# Altium footprint library Connector_FPC.PcbLib: 36 footprints (part 2 of 3)
Each footprint in its own frame and in the unit in brackets; x right, y up, seen from the top. Pads: shape width x height; smd on the part's side, far side on the other; paste and mask are expansions set on the pad; w line width, h text height; cw(c..) or ccw(c..) is an arc to the next point about the centre after c.
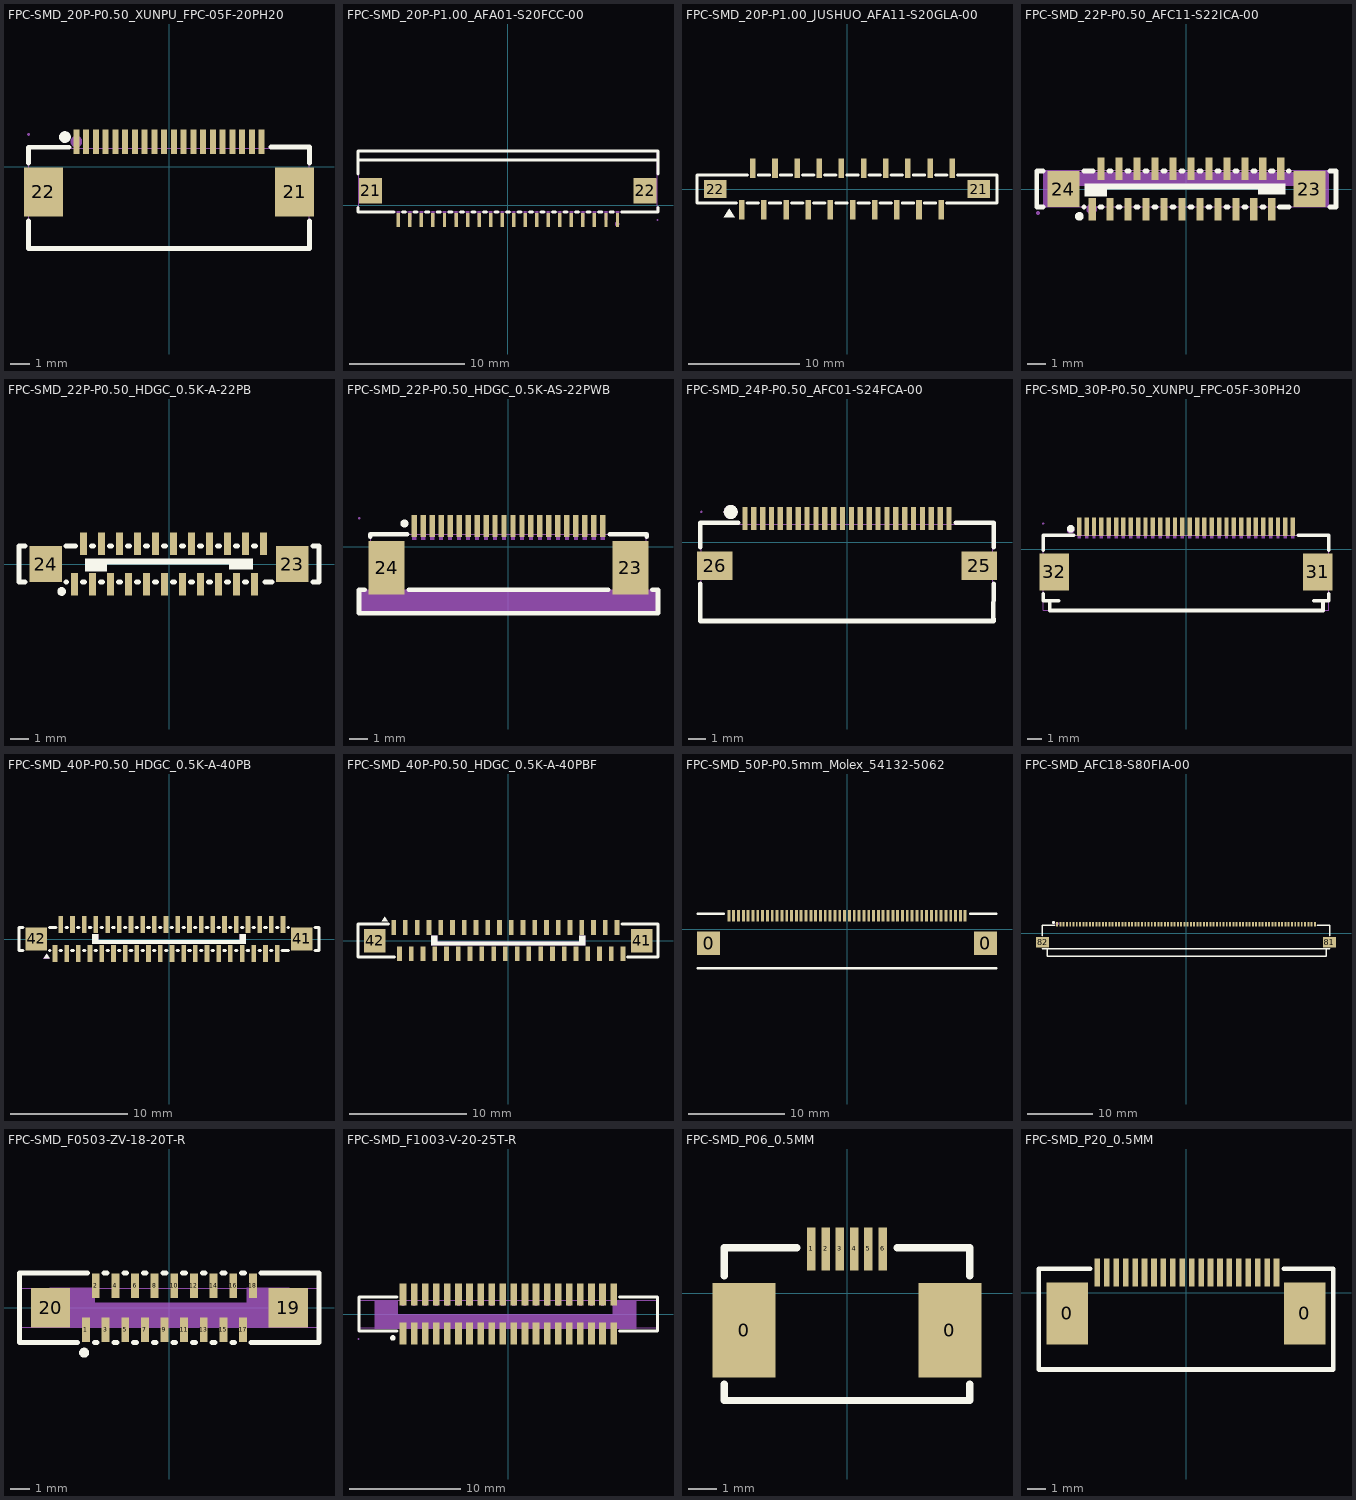
[diagram p1: the footprints below, top view; thin cyan lines are the x and y axes]

## FPC-SMD_20P-P0.50_XUNPU_FPC-05F-20PH20 [mm]
pads (22):
  rect 0.3x1.25 smd paste+0 mask+0.05: 1(-4.75,1.288) 2(-4.25,1.288) 3(-3.75,1.288) 4(-3.25,1.288) 5(-2.75,1.288) 6(-2.25,1.288) 7(-1.75,1.288) 8(-1.25,1.288) 9(-0.75,1.288) 10(-0.25,1.288) 11(0.25,1.288) 12(0.75,1.288) 13(1.25,1.288) 14(1.75,1.288) 15(2.25,1.288) 16(2.75,1.288) 17(3.25,1.288) 18(3.75,1.288) 19(4.25,1.288) 20(4.75,1.288)
  rect 2x2.5 smd paste+0 mask+0.05: 21(6.44,-1.287) 22(-6.44,-1.287)
Top Overlay:
  circle w0.3: c-5.334,1.524 r0.15
  lines w0.254: -7.2,-2.769 -7.2,-3.912 -7.2,-4.191 7.2,-4.191 7.2,-3.912 7.2,-2.769 ; -7.2,0.194 -7.2,1 -5.131,1 ; 5.223,1.016 7.2,1.016 7.2,0.194
Mechanical 4:
  circle w0.3: c-4.75,1.288 r0.15
Mechanical 7:
  lines w0.051: -7.2,-4.157 7.2,-4.157 7.2,0.963 -7.2,0.963 -7.2,-4.157
Mechanical 9:
  region: -7.26,1.663 -7.26,1.638 -7.225,1.603 -7.175,1.603 -7.14,1.638 -7.14,1.663 -7.14,1.687 -7.175,1.723 -7.225,1.723 -7.26,1.687 -7.26,1.663
Mechanical 10:
  region: -7.2,-1.788 -7.2,-0.788 -6,-0.788 -6,-1.788
  region: 6,-1.788 6,-0.788 7.2,-0.788 7.2,-1.788
  region: -4.825,1.663 -4.675,1.663 -4.675,0.912 -4.825,0.912
  region: -4.325,1.663 -4.175,1.663 -4.175,0.912 -4.325,0.912
  region: -3.825,1.663 -3.675,1.663 -3.675,0.912 -3.825,0.912
  region: -3.325,1.663 -3.175,1.663 -3.175,0.912 -3.325,0.912
  region: -2.825,1.663 -2.675,1.663 -2.675,0.912 -2.825,0.912
  region: -2.325,1.663 -2.175,1.663 -2.175,0.912 -2.325,0.912
  region: -1.825,1.663 -1.675,1.663 -1.675,0.912 -1.825,0.912
  region: -1.325,1.663 -1.175,1.663 -1.175,0.912 -1.325,0.912
  region: -0.825,1.663 -0.675,1.663 -0.675,0.912 -0.825,0.912
  region: -0.325,1.663 -0.175,1.663 -0.175,0.912 -0.325,0.912
  region: 0.175,1.663 0.325,1.663 0.325,0.912 0.175,0.912
  region: 0.675,1.663 0.825,1.663 0.825,0.912 0.675,0.912
  region: 1.175,1.663 1.325,1.663 1.325,0.912 1.175,0.912
  region: 1.675,1.663 1.825,1.663 1.825,0.912 1.675,0.912
  region: 2.175,1.663 2.325,1.663 2.325,0.912 2.175,0.912
  region: 2.675,1.663 2.825,1.663 2.825,0.912 2.675,0.912
  region: 3.175,1.663 3.325,1.663 3.325,0.912 3.175,0.912
  region: 3.675,1.663 3.825,1.663 3.825,0.912 3.675,0.912
  region: 4.175,1.663 4.325,1.663 4.325,0.912 4.175,0.912
  region: 4.675,1.663 4.825,1.663 4.825,0.912 4.675,0.912
3D body "3.step": height 2.01, standoff 0, extent -7.2,-3.86 7.2,1.26

## FPC-SMD_20P-P1.00_AFA01-S20FCC-00 [mm]
pads (22):
  rect 0.3x1.25 smd mask+0.051: 1(9.5,-1.263) 2(8.5,-1.263) 3(7.5,-1.263) 4(6.5,-1.263) 5(5.5,-1.263) 6(4.5,-1.263) 7(3.5,-1.263) 8(2.5,-1.263) 9(1.5,-1.263) 10(0.5,-1.263) 11(-0.5,-1.263) 12(-1.5,-1.263) 13(-2.5,-1.263) 14(-3.5,-1.263) 15(-4.5,-1.263) 16(-5.5,-1.263) 17(-6.5,-1.263) 18(-7.5,-1.263) 19(-8.5,-1.263) 20(-9.5,-1.263)
  rect 2x2.2 smd mask+0.051: 21(-11.9,1.263) 22(11.9,1.263)
Top Overlay:
  lines w0.254: -13,-0.196 -13,-0.562 -9.869,-0.562 ; -13,2.721 -13,4.737 13,4.737 13,2.721 ; -13,3.938 13,3.938 ; -9.132,-0.562 -8.869,-0.562 ; -8.132,-0.562 -7.869,-0.562 ; -7.132,-0.562 -6.869,-0.562 ; -6.132,-0.562 -5.869,-0.562 ; -5.132,-0.562 -4.869,-0.562 ; -4.132,-0.562 -3.869,-0.562 ; -3.132,-0.562 -2.869,-0.562 ; -2.132,-0.562 -1.869,-0.562 ; -1.132,-0.562 -0.869,-0.562 ; -0.132,-0.562 0.131,-0.562 ; 0.868,-0.562 1.131,-0.562 ; 1.868,-0.562 2.131,-0.562 ; 2.868,-0.562 3.131,-0.562 ; 3.868,-0.562 4.131,-0.562 ; 4.868,-0.562 5.131,-0.562 ; 5.868,-0.562 6.131,-0.562 ; 6.868,-0.562 7.131,-0.562 ; 7.868,-0.562 8.131,-0.562 ; 8.868,-0.562 9.131,-0.562 ; 9.868,-0.562 13,-0.562 13,-0.196
Mechanical 6:
  circle w0.2: c9.472,-1.607 r0.1
Mechanical 15:
  region: -12.95,2.263 -10.95,2.263 -10.95,0.263 -12.95,0.263
  region: 10.95,2.263 12.95,2.263 12.95,0.263 10.95,0.263
  region: 9.4,-1.262 9.4,-0.512 9.6,-0.512 9.6,-1.262
  region: 8.4,-1.262 8.4,-0.512 8.6,-0.512 8.6,-1.262
  region: 7.4,-1.262 7.4,-0.512 7.6,-0.512 7.6,-1.262
  region: 6.4,-1.262 6.4,-0.512 6.6,-0.512 6.6,-1.262
  region: 5.4,-1.262 5.4,-0.512 5.6,-0.512 5.6,-1.262
  region: 4.4,-1.262 4.4,-0.512 4.6,-0.512 4.6,-1.262
  region: 3.4,-1.262 3.4,-0.512 3.6,-0.512 3.6,-1.262
  region: 2.4,-1.262 2.4,-0.512 2.6,-0.512 2.6,-1.262
  region: 1.4,-1.262 1.4,-0.512 1.6,-0.512 1.6,-1.262
  region: 0.4,-1.262 0.4,-0.512 0.6,-0.512 0.6,-1.262
  region: -0.6,-1.262 -0.6,-0.512 -0.4,-0.512 -0.4,-1.262
  region: -1.6,-1.262 -1.6,-0.512 -1.4,-0.512 -1.4,-1.262
  region: -2.6,-1.262 -2.6,-0.512 -2.4,-0.512 -2.4,-1.262
  region: -3.6,-1.262 -3.6,-0.512 -3.4,-0.512 -3.4,-1.262
  region: -4.6,-1.262 -4.6,-0.512 -4.4,-0.512 -4.4,-1.262
  region: -5.6,-1.262 -5.6,-0.512 -5.4,-0.512 -5.4,-1.262
  region: -6.6,-1.262 -6.6,-0.512 -6.4,-0.512 -6.4,-1.262
  region: -7.6,-1.262 -7.6,-0.512 -7.4,-0.512 -7.4,-1.262
  region: -8.6,-1.262 -8.6,-0.512 -8.4,-0.512 -8.4,-1.262
  region: -9.6,-1.262 -9.6,-0.512 -9.4,-0.512 -9.4,-1.262
  region: 13.01,-1.262 13.01,-1.238 12.975,-1.202 12.925,-1.202 12.89,-1.238 12.89,-1.262 12.89,-1.287 12.925,-1.322 12.975,-1.322 13.01,-1.287 13.01,-1.262
  lines w0.051: -12.95,-0.562 12.95,-0.562 12.95,4.688 -12.95,4.688 -12.95,-0.562
3D body "FPC1.stp": height 2.01, standoff 0, extent -12.95,-1.498 12.95,4.472

## FPC-SMD_20P-P1.00_JUSHUO_AFA11-S20GLA-00 [mm]
pads (22):
  rect 0.5x1.75 smd: 1(-9.5,-1.875) 2(-8.5,1.875) 3(-7.5,-1.875) 4(-6.5,1.875) 5(-5.5,-1.875) 6(-4.5,1.875) 7(-3.5,-1.875) 8(-2.5,1.875) 9(-1.5,-1.875) 10(-0.5,1.875) 11(0.5,-1.875) 12(1.5,1.875) 13(2.5,-1.875) 14(3.5,1.875) 15(4.5,-1.875) 16(5.5,1.875) 17(6.5,-1.875) 18(7.5,1.875) 19(8.5,-1.875) 20(9.5,1.875)
  rect 2x1.6 smd: 21(11.9,0) 22(-11.9,0)
Top Overlay:
  region: -10.621,-1.778 -11.129,-2.54 -10.113,-2.54
  lines w0.254: -9.981,-1.25 -13.542,-1.25 -13.542,1.25 -8.981,1.25 ; -9.019,-1.25 -7.981,-1.25 ; -8.019,1.25 -6.981,1.25 ; -7.019,-1.25 -5.981,-1.25 ; -6.019,1.25 -4.981,1.25 ; -5.019,-1.25 -3.981,-1.25 ; -4.019,1.25 -2.981,1.25 ; -3.019,-1.25 -1.981,-1.25 ; -2.019,1.25 -0.981,1.25 ; -1.019,-1.25 0.019,-1.25 ; -0.019,1.25 1.019,1.25 ; 0.981,-1.25 2.019,-1.25 ; 1.981,1.25 3.019,1.25 ; 2.981,-1.25 4.019,-1.25 ; 3.981,1.25 5.019,1.25 ; 4.981,-1.25 6.019,-1.25 ; 5.981,1.25 7.019,1.25 ; 6.981,-1.25 8.019,-1.25 ; 7.981,1.25 9.019,1.25 ; 8.981,-1.25 10.019,-1.25 ; 9.981,1.25 13.542,1.25 13.542,-1.25 10.033,-1.25
3D body "X1.stp": height 5.4, standoff 0, extent -13.5,-2.25 13.5,2.25

## FPC-SMD_22P-P0.50_AFC11-S22ICA-00 [mm]
pads (24):
  rect 0.399x1.25 smd mask+0.05: 1(-5.249,-1.125) 2(-4.749,1.125) 3(-4.251,-1.125) 4(-3.75,1.125) 5(-3.25,-1.125) 6(-2.75,1.125) 7(-2.249,-1.125) 8(-1.749,1.125) 9(-1.248,-1.125) 10(-0.751,1.125) 11(-0.25,-1.125) 12(0.25,1.125) 13(0.751,-1.125) 14(1.251,1.125) 15(1.751,-1.125) 16(2.249,1.125) 17(2.75,-1.125) 18(3.25,1.125) 19(3.75,-1.125) 20(4.248,1.125) 21(4.749,-1.125) 22(5.249,1.125)
  rect 1.801x1.999 smd mask+0.05: 23(6.849,0) 24(-6.849,0)
Top Overlay:
  circle w0.254: c-5.96,-1.524 r0.114
  region: 5.501,0.3 5.501,-0.3 4,-0.3 4,0 -4.449,0 -4.449,-0.4 -5.649,-0.4 -5.649,0.3
  lines w0.254: -7.982,-1.001 -8.325,-1.001 -8.325,1.001 -8,1.001 -7.982,1.001 ; -5.719,-1.001 -5.681,-1.001 ; -5.719,1.001 -5.18,1.001 ; -4.82,-1.001 -4.68,-1.001 ; -4.319,1.001 -4.18,1.001 ; -3.819,-1.001 -3.682,-1.001 ; -3.319,1.001 -3.181,1.001 ; -2.818,-1.001 -2.681,-1.001 ; -2.318,1.001 -2.181,1.001 ; -1.817,-1.001 -1.68,-1.001 ; -1.32,1.001 -1.18,1.001 ; -0.819,-1.001 -0.682,-1.001 ; -0.319,1.001 -0.182,1.001 ; 0.182,-1.001 0.319,-1.001 ; 0.682,1.001 0.819,1.001 ; 1.182,-1.001 1.32,-1.001 ; 1.683,1.001 1.82,1.001 ; 2.181,-1.001 2.32,-1.001 ; 2.681,1.001 2.818,1.001 ; 3.181,-1.001 3.319,-1.001 ; 3.682,1.001 3.819,1.001 ; 4.18,-1.001 4.319,-1.001 ; 4.68,1.001 4.817,1.001 ; 5.18,-1.001 5.317,-1.001 5.719,-1.001 ; 5.681,1.001 5.719,1.001 ; 7.979,-1.001 8.325,-1.001 8.325,1.001 7.979,1.001
Mechanical 6:
  circle w0.3: c-5.276,-1.113 r0.15
  region: -6.35,0.175 -6.35,-0.925 -7.9,-0.925 -7.9,0.925 7.85,0.925 7.85,-0.875 6.35,-0.875 6.35,0.175
Mechanical 15:
  region: 5.132,1.521 5.332,1.521 5.332,0.721 5.132,0.721
  region: 4.632,-0.679 4.832,-0.679 4.832,-1.479 4.632,-1.479
  region: 4.132,1.521 4.332,1.521 4.332,0.721 4.132,0.721
  region: 3.632,-0.679 3.832,-0.679 3.832,-1.479 3.632,-1.479
  region: 3.132,1.521 3.332,1.521 3.332,0.721 3.132,0.721
  region: 2.632,-0.679 2.832,-0.679 2.832,-1.479 2.632,-1.479
  region: 2.132,1.521 2.332,1.521 2.332,0.721 2.132,0.721
  region: 1.632,-0.679 1.832,-0.679 1.832,-1.479 1.632,-1.479
  region: 1.132,1.521 1.332,1.521 1.332,0.721 1.132,0.721
  region: 0.632,-0.679 0.832,-0.679 0.832,-1.479 0.632,-1.479
  region: 0.132,1.521 0.332,1.521 0.332,0.721 0.132,0.721
  region: -0.368,-0.679 -0.168,-0.679 -0.168,-1.479 -0.368,-1.479
  region: -0.868,1.521 -0.668,1.521 -0.668,0.721 -0.868,0.721
  region: -1.368,-0.679 -1.168,-0.679 -1.168,-1.479 -1.368,-1.479
  region: -1.868,1.521 -1.668,1.521 -1.668,0.721 -1.868,0.721
  region: -2.368,-0.679 -2.168,-0.679 -2.168,-1.479 -2.368,-1.479
  region: -2.868,1.521 -2.668,1.521 -2.668,0.721 -2.868,0.721
  region: -3.368,-0.679 -3.168,-0.679 -3.168,-1.479 -3.368,-1.479
  region: -3.868,1.521 -3.668,1.521 -3.668,0.721 -3.868,0.721
  region: -4.368,-0.679 -4.168,-0.679 -4.168,-1.479 -4.368,-1.479
  region: -4.868,1.521 -4.668,1.521 -4.668,0.721 -4.868,0.721
  region: -5.368,-0.679 -5.168,-0.679 -5.168,-1.479 -5.368,-1.479
  region: 7.932,1.041 7.932,-0.959 6.132,-0.959 6.132,1.041
  region: -6.168,1.051 -6.168,-0.949 -7.968,-0.949 -7.968,1.051
  region: -8.176,-1.335 -8.176,-1.294 -8.235,-1.235 -8.318,-1.235 -8.376,-1.294 -8.376,-1.335 -8.376,-1.377 -8.318,-1.435 -8.235,-1.435 -8.176,-1.377 -8.176,-1.335
  lines w0.051: -8.318,-0.999 -8.318,0.741 cw(c-8.018,0.741) -8.018,1.041 -7.988,1.041 5.332,1.041 8.012,1.041 8.052,1.041 cw(c8.052,0.801) 8.292,0.801 8.292,-0.989 8.292,-0.999 -8.318,-0.999
3D body "AFC11-S22ICC-001.step": height 4.4, standoff 0, extent -8.3,-1.5 8.3,1.5

## FPC-SMD_22P-P0.50_HDGC_0.5K-A-22PB [mil]
pads (24):
  rect 15.7x49.2 smd mask+1.97: 1(-206.7,-44.3) 2(-187,44.3) 3(-167.4,-44.3) 4(-147.7,44.3) 5(-128,-44.3) 6(-108.3,44.3) 7(-88.6,-44.3) 8(-68.9,44.3) 9(-49.2,-44.3) 10(-29.6,44.3) 11(-9.9,-44.3) 12(9.8,44.3) 13(29.5,-44.3) 14(49.2,44.3) 15(68.9,-44.3) 16(88.5,44.3) 17(108.2,-44.3) 18(127.9,44.3) 19(147.6,-44.3) 20(167.3,44.3) 21(187,-44.3) 22(206.7,44.3)
  rect 70.9x78.7 smd mask+1.97: 23(269.7,0) 24(-269.7,0)
Top Overlay:
  circle w10: c-234.7,-60 r4.5
  region: 183.07,11.81 183.07,-11.81 131.89,-11.81 131.89,0 -135.83,0 -135.83,-15.75 -183.07,-15.75 -183.07,11.81 183.07,11.81
  lines w10: -314.3,-39.4 -327.8,-39.4 -327.8,39.4 -315,39.4 -314.3,39.4 ; -225.2,-39.4 -223.7,-39.4 ; -225.2,39.4 -204,39.4 ; -189.8,-39.4 -184.3,-39.4 ; -170.1,39.4 -164.6,39.4 ; -150.4,-39.4 -145,-39.4 ; -130.7,39.4 -125.3,39.4 ; -111,-39.4 -105.6,-39.4 ; -91.3,39.4 -85.9,39.4 ; -71.6,-39.4 -66.2,-39.4 ; -52,39.4 -46.5,39.4 ; -32.3,-39.4 -26.9,-39.4 ; -12.6,39.4 -7.2,39.4 ; 7.1,-39.4 12.5,-39.4 ; 26.8,39.4 32.2,39.4 ; 46.5,-39.4 51.9,-39.4 ; 66.2,39.4 71.6,39.4 ; 85.8,-39.4 91.3,-39.4 ; 105.5,39.4 110.9,39.4 ; 125.2,-39.4 130.6,-39.4 ; 144.9,39.4 150.3,39.4 ; 164.6,-39.4 170,-39.4 ; 184.3,39.4 189.7,39.4 ; 209.4,-39.4 225.2,-39.4 ; 314.2,-39.4 327.8,-39.4 327.8,39.4 314.2,39.4
3D body "FPC1.stp": height 173.23, standoff 0, extent -326.77,-59.06 326.77,59.05

## FPC-SMD_22P-P0.50_HDGC_0.5K-AS-22PWB [mm] "0.5K-AS-22PWB  卧贴 上接"
pads (24):
  rect 0.3x1.25 smd mask+0.051: 1(-5.25,1.163) 2(-4.75,1.163) 3(-4.25,1.163) 4(-3.75,1.163) 5(-3.25,1.163) 6(-2.75,1.163) 7(-2.25,1.163) 8(-1.75,1.163) 9(-1.25,1.163) 10(-0.75,1.163) 11(-0.25,1.163) 12(0.25,1.163) 13(0.75,1.163) 14(1.25,1.163) 15(1.75,1.163) 16(2.25,1.163) 17(2.75,1.163) 18(3.25,1.163) 19(3.75,1.163) 20(4.25,1.163) 21(4.75,1.163) 22(5.25,1.163)
  rect 2x3 smd mask+0.051: 23(6.79,-1.163) 24(-6.79,-1.163)
Top Overlay:
  circle w0.254: c-5.8,1.3 r0.1
  lines w0.254: -8.021,-2.4 -8.33,-2.4 -8.33,-3.7 8.33,-3.7 8.33,-2.4 8.021,-2.4 ; -7.7,0.569 -7.7,0.7 -5.631,0.7 ; -5.559,-2.4 5.559,-2.4 ; 5.631,0.7 7.7,0.7 7.7,0.569
Mechanical 6:
  region: -8.3,-2.4 -8.3,-3.7 8.3,-3.7 8.3,-2.4
Mechanical 15:
  region: -7.59,0.038 -5.99,0.038 -5.99,-2.362 -7.59,-2.362
  region: 5.99,0.038 7.59,0.038 7.59,-2.362 5.99,-2.362
  region: -5.35,1.6 -5.15,1.6 -5.15,0.4 -5.35,0.4
  region: -4.85,1.6 -4.65,1.6 -4.65,0.4 -4.85,0.4
  region: -4.35,1.6 -4.15,1.6 -4.15,0.4 -4.35,0.4
  region: -3.85,1.6 -3.65,1.6 -3.65,0.4 -3.85,0.4
  region: -3.35,1.6 -3.15,1.6 -3.15,0.4 -3.35,0.4
  region: -2.85,1.6 -2.65,1.6 -2.65,0.4 -2.85,0.4
  region: -2.35,1.6 -2.15,1.6 -2.15,0.4 -2.35,0.4
  region: -1.35,1.6 -1.15,1.6 -1.15,0.4 -1.35,0.4
  region: -0.85,1.6 -0.65,1.6 -0.65,0.4 -0.85,0.4
  region: -1.85,1.6 -1.65,1.6 -1.65,0.4 -1.85,0.4
  region: -0.35,1.6 -0.15,1.6 -0.15,0.4 -0.35,0.4
  region: 0.15,1.6 0.35,1.6 0.35,0.4 0.15,0.4
  region: 0.65,1.6 0.85,1.6 0.85,0.4 0.65,0.4
  region: 1.15,1.6 1.35,1.6 1.35,0.4 1.15,0.4
  region: 1.65,1.6 1.85,1.6 1.85,0.4 1.65,0.4
  region: 2.15,1.6 2.35,1.6 2.35,0.4 2.15,0.4
  region: 2.65,1.6 2.85,1.6 2.85,0.4 2.65,0.4
  region: 3.15,1.6 3.35,1.6 3.35,0.4 3.15,0.4
  region: 3.65,1.6 3.85,1.6 3.85,0.4 3.65,0.4
  region: 4.15,1.6 4.35,1.6 4.35,0.4 4.15,0.4
  region: 4.65,1.6 4.85,1.6 4.85,0.4 4.65,0.4
  region: 5.15,1.6 5.35,1.6 5.35,0.4 5.15,0.4
  region: -8.265,1.6 -8.265,1.625 -8.3,1.66 -8.35,1.66 -8.385,1.625 -8.385,1.6 -8.385,1.575 -8.35,1.54 -8.3,1.54 -8.265,1.575 -8.265,1.6
  lines w0.051: -8.325,-3.7 8.325,-3.7 8.325,-2.4 7.675,-2.4 7.675,0.7 -7.675,0.7 -7.675,-2.4 -8.325,-2.4 -8.325,-3.7
3D body "Unnamed-COMPOUND001.step": height 2.54, standoff 0, extent -8.85,-3.823 8.85,1.477

## FPC-SMD_24P-P0.50_AFC01-S24FCA-00 [mil]
pads (26):
  rect 11.8x51.2 smd paste+0 mask+2: 1(-226.4,52.2) 2(-206.7,52.2) 3(-187,52.2) 4(-167.4,52.2) 5(-147.7,52.2) 6(-128,52.2) 7(-108.3,52.2) 8(-88.6,52.2) 9(-68.9,52.2) 10(-49.2,52.2) 11(-29.6,52.2) 12(-9.9,52.2) 13(9.8,52.2) 14(29.5,52.2) 15(49.2,52.2) 16(68.9,52.2) 17(88.6,52.2) 18(108.2,52.2) 19(127.9,52.2) 20(147.6,52.2) 21(167.3,52.2) 22(187,52.2) 23(206.7,52.2) 24(226.3,52.2)
  rect 78.7x63 smd: 25(293.3,-52.2) 26(-293.3,-52.2)
Top Overlay:
  lines w10: -325.4,-92.7 -325.4,-175 325,-175 325,-170 ; -325.3,-11.6 -325.3,42.9 -241.4,42.9 ; 241.4,42.9 325.3,42.9 325.3,-11.6 ; 324.8,-171.2 325.3,-92.7
  lines w15.7: -265.8,66.9 -265.4,64.5 -264.3,62.3 -262.5,60.6 -260.3,59.5 -257.9,59.1 -255.5,59.5 -253.3,60.6 -251.5,62.3 -250.4,64.5 -250,66.9 -250.4,69.4 -251.5,71.6 -253.3,73.3 -255.5,74.4 -257.9,74.8 -260.3,74.4 -262.5,73.3 -264.3,71.6 -265.4,69.4 -265.8,66.9
Mechanical 4:
  lines w15.7: -265.8,66.9 -265.4,64.5 -264.3,62.3 -262.5,60.6 -260.3,59.5 -257.9,59.1 -255.5,59.5 -253.3,60.6 -251.5,62.3 -250.4,64.5 -250,66.9 -250.4,69.4 -251.5,71.6 -253.3,73.3 -255.5,74.4 -257.9,74.8 -260.3,74.4 -262.5,73.3 -264.3,71.6 -265.4,69.4 -265.8,66.9
Mechanical 7:
  lines w2: -322.9,-173 -322.9,39.6 322.8,39.6 322.8,-173 -322.9,-173
Mechanical 9:
  region: -320.5,67.2 -320.9,65.9 -321.9,65 -323.2,64.8 -324.4,65.4 -325.1,66.5 -325.1,67.8 -324.4,68.9 -323.2,69.5 -321.9,69.3 -320.9,68.4
Mechanical 10:
  region: 322.8,-32.5 322.8,-71.8 263.7,-71.8 263.7,-32.5
  region: -263.8,-32.5 -263.8,-71.8 -322.9,-71.8 -322.9,-32.5
  region: -222.5,37.6 -230.3,37.6 -230.3,67.1 -222.5,67.1
  region: -202.8,37.6 -210.7,37.6 -210.7,67.1 -202.8,67.1
  region: -183.1,37.6 -191,37.6 -191,67.1 -183.1,67.1
  region: -163.4,37.6 -171.3,37.6 -171.3,67.1 -163.4,67.1
  region: -143.7,37.6 -151.6,37.6 -151.6,67.1 -143.7,67.1
  region: -124,37.6 -131.9,37.6 -131.9,67.1 -124,67.1
  region: -104.4,37.6 -112.2,37.6 -112.2,67.1 -104.4,67.1
  region: -84.7,37.6 -92.5,37.6 -92.5,67.1 -84.7,67.1
  region: -65,37.6 -72.9,37.6 -72.9,67.1 -65,67.1
  region: -45.3,37.6 -53.2,37.6 -53.2,67.1 -45.3,67.1
  region: -25.6,37.6 -33.5,37.6 -33.5,67.1 -25.6,67.1
  region: -5.9,37.6 -13.8,37.6 -13.8,67.1 -5.9,67.1
  region: 13.8,37.6 5.9,37.6 5.9,67.1 13.8,67.1
  region: 33.4,37.6 25.6,37.6 25.6,67.1 33.4,67.1
  region: 53.1,37.6 45.3,37.6 45.3,67.1 53.1,67.1
  region: 72.8,37.6 64.9,37.6 64.9,67.1 72.8,67.1
  region: 92.5,37.6 84.6,37.6 84.6,67.1 92.5,67.1
  region: 112.2,37.6 104.3,37.6 104.3,67.1 112.2,67.1
  region: 131.9,37.6 124,37.6 124,67.1 131.9,67.1
  region: 151.5,37.6 143.7,37.6 143.7,67.1 151.5,67.1
  region: 171.2,37.6 163.4,37.6 163.4,67.1 171.2,67.1
  region: 190.9,37.6 183,37.6 183,67.1 190.9,67.1
  region: 210.6,37.6 202.7,37.6 202.7,67.1 210.6,67.1
  region: 230.3,37.6 222.4,37.6 222.4,67.1 230.3,67.1
3D body "FPC-SMD_24P-P0.50_AFC01-S24FCA-00.step": height 77.95, standoff -1.18, extent -322.83,-172.24 322.83,67.91

## FPC-SMD_30P-P0.50_XUNPU_FPC-05F-30PH20 [mm]
pads (32):
  rect 0.3x1.25 smd mask+0.05: 1(-7.25,1.538) 2(-6.75,1.538) 3(-6.25,1.538) 4(-5.75,1.538) 5(-5.25,1.538) 6(-4.75,1.538) 7(-4.25,1.538) 8(-3.75,1.538) 9(-3.25,1.538) 10(-2.75,1.538) 11(-2.25,1.538) 12(-1.75,1.538) 13(-1.25,1.538) 14(-0.75,1.538) 15(-0.25,1.538) 16(0.25,1.538) 17(0.75,1.538) 18(1.25,1.538) 19(1.75,1.538) 20(2.25,1.538) 21(2.75,1.538) 22(3.25,1.538) 23(3.75,1.538) 24(4.25,1.538) 25(4.75,1.538) 26(5.25,1.538) 27(5.75,1.538) 28(6.25,1.538) 29(6.75,1.538) 30(7.25,1.538)
  rect 2x2.5 smd mask+0.05: 31(8.94,-1.538) 32(-8.94,-1.538)
Top Overlay:
  circle w0.254: c-7.827,1.401 r0.127
  lines w0.254: -9.7,-3.019 -9.7,-3.5 -8.65,-3.5 ; -9.7,-0.056 -9.7,0.95 -7.631,0.95 ; -9.248,-3.5 -9.248,-4.15 9.3,-4.15 9.3,-3.55 ; 7.631,0.95 9.7,0.95 9.7,-0.056 ; 8.7,-3.5 9.7,-3.5 9.7,-3.019
Mechanical 5:
  drawing of 32 lines, arcs and shapes, not listed
Mechanical 6:
  region: -9.64,1.755 -9.64,1.767 -9.649,1.789 -9.666,1.806 -9.688,1.815 -9.7,1.815 -9.712,1.815 -9.734,1.806 -9.751,1.789 -9.76,1.767 -9.76,1.755 -9.76,1.743 -9.751,1.721 -9.734,1.704 -9.712,1.695 -9.7,1.695 -9.688,1.695 -9.666,1.704 -9.649,1.721 -9.64,1.743
Mechanical 8:
  lines w0.051: -9.7,-4.155 -9.7,0.965 9.7,0.965 9.7,-4.155 -9.7,-4.155
Mechanical 11:
  circle w0.254: c-7.837,1.313 r0.127
3D body "未命名-EasyEDA PCB Model~GeCpFPC-SMD_30P-P0.50_XUNPU_FPC-05F-30PH20~FPC-SMD_30P-P0.50_XUNPU_FPC-05F-30PH20~GeCp034.step": height 2, standoff 0, extent -9.7,-4.15 9.7,1.25

## FPC-SMD_40P-P0.50_HDGC_0.5K-A-40PB [mm]
pads (42):
  rect 0.4x1.45 smd: 1(-9.75,-1.252) 2(-9.25,1.252) 3(-8.75,-1.252) 4(-8.25,1.252) 5(-7.75,-1.252) 6(-7.25,1.252) 7(-6.75,-1.252) 8(-6.25,1.252) 9(-5.75,-1.252) 10(-5.25,1.252) 11(-4.75,-1.252) 12(-4.25,1.252) 13(-3.75,-1.252) 14(-3.25,1.252) 15(-2.75,-1.252) 16(-2.25,1.252) 17(-1.75,-1.252) 18(-1.25,1.252) 19(-0.75,-1.252) 20(-0.25,1.252) 21(0.25,-1.252) 22(0.75,1.252) 23(1.25,-1.252) 24(1.75,1.252) 25(2.25,-1.252) 26(2.75,1.252) 27(3.25,-1.252) 28(3.75,1.252) 29(4.25,-1.252) 30(4.75,1.252) 31(5.25,-1.252) 32(5.75,1.252) 33(6.25,-1.252) 34(6.75,1.252) 35(7.25,-1.252) 36(7.75,1.252) 37(8.25,-1.252) 38(8.75,1.252) 39(9.25,-1.252) 40(9.75,1.252)
  rect 1.8x2 smd: 41(11.35,0) 42(-11.35,0)
Top Overlay:
  region: -6.55,-0.4 -6.55,0.4 -6.05,0.4 -6.05,-0.1 6.05,-0.1 6.05,0.4 6.55,0.4 6.55,-0.4
  region: -10.454,-1.27 -10.2,-1.651 -10.708,-1.651
  lines w0.254: -12.481,-1 -12.825,-1 -12.825,1 -12.481,1 ; -10.219,-1 -10.181,-1 ; -10.219,1 -9.681,1 ; -9.319,-1 -9.181,-1 ; -8.819,1 -8.681,1 ; -8.319,-1 -8.181,-1 ; -7.819,1 -7.681,1 ; -7.319,-1 -7.181,-1 ; -6.819,1 -6.681,1 ; -6.319,-1 -6.181,-1 ; -5.819,1 -5.681,1 ; -5.319,-1 -5.181,-1 ; -4.819,1 -4.681,1 ; -4.319,-1 -4.181,-1 ; -3.819,1 -3.681,1 ; -3.319,-1 -3.181,-1 ; -2.819,1 -2.681,1 ; -2.319,-1 -2.181,-1 ; -1.819,1 -1.681,1 ; -1.319,-1 -1.181,-1 ; -0.819,1 -0.681,1 ; -0.319,-1 -0.181,-1 ; 0.181,1 0.319,1 ; 0.681,-1 0.819,-1 ; 1.181,1 1.319,1 ; 1.681,-1 1.819,-1 ; 2.181,1 2.319,1 ; 2.681,-1 2.819,-1 ; 3.181,1 3.319,1 ; 3.681,-1 3.819,-1 ; 4.181,1 4.319,1 ; 4.681,-1 4.819,-1 ; 5.181,1 5.319,1 ; 5.681,-1 5.819,-1 ; 6.181,1 6.319,1 ; 6.681,-1 6.819,-1 ; 7.181,1 7.319,1 ; 7.681,-1 7.819,-1 ; 8.181,1 8.319,1 ; 8.681,-1 8.819,-1 ; 9.181,1 9.319,1 ; 9.681,-1 9.819,-1 10.219,-1 ; 10.181,1 10.219,1 ; 12.481,-1 12.825,-1 12.825,1 12.481,1
Mechanical 15:
  region: -6.55,-0.4 -6.55,0.4 -6.05,0.4 -6.05,-0.1 6.05,-0.1 6.05,0.4 6.55,0.4 6.55,-0.4
  region: -10.5,-1.31 -10.246,-1.691 -10.754,-1.691
3D body "FPC3.stp": height 5.15, standoff 0, extent -13.199,-1.5 13.199,1.5

## FPC-SMD_40P-P0.50_HDGC_0.5K-A-40PBF [mm]
pads (42):
  rect 0.4x1.25 smd: 1(-9.75,1.125) 2(-9.25,-1.125) 3(-8.75,1.125) 4(-8.25,-1.125) 5(-7.75,1.125) 6(-7.25,-1.125) 7(-6.75,1.125) 8(-6.25,-1.125) 9(-5.75,1.125) 10(-5.25,-1.125) 11(-4.75,1.125) 12(-4.25,-1.125) 13(-3.75,1.125) 14(-3.25,-1.125) 15(-2.75,1.125) 16(-2.25,-1.125) 17(-1.75,1.125) 18(-1.25,-1.125) 19(-0.75,1.125) 20(-0.25,-1.125) 21(0.25,1.125) 22(0.75,-1.125) 23(1.25,1.125) 24(1.75,-1.125) 25(2.25,1.125) 26(2.75,-1.125) 27(3.25,1.125) 28(3.75,-1.125) 29(4.25,1.125) 30(4.75,-1.125) 31(5.25,1.125) 32(5.75,-1.125) 33(6.25,1.125) 34(6.75,-1.125) 35(7.25,1.125) 36(7.75,-1.125) 37(8.25,1.125) 38(8.75,-1.125) 39(9.25,1.125) 40(9.75,-1.125)
  rect 1.8x2 smd: 41(11.35,0) 42(-11.35,0)
Top Overlay:
  region: -6.55,-0.4 -6.55,0.4 -6.05,0.4 -6.05,-0.1 6.05,-0.1 6.05,0.4 6.55,0.4 6.55,-0.4
  region: -10.494,2.032 -10.748,1.651 -10.24,1.651
  lines w0.254: -10.181,1.397 -12.78,1.397 -12.78,-1.397 -9.681,-1.397 ; 9.68,1.4 12.728,1.4 12.728,-1.394 10.129,-1.394
Mechanical 15:
  region: -6.55,-0.4 -6.55,0.4 -6.05,0.4 -6.05,-0.1 6.05,-0.1 6.05,0.4 6.55,0.4 6.55,-0.4
3D body "CONN-SMD_FPC-0.5MM-40P.stp": height 5.15, standoff 0, extent -13.199,-1.5 13.199,1.5

## FPC-SMD_50P-P0.5mm_Molex_54132-5062 [mm]
pads (52):
  rect 2.4x2.4 smd: 0(-14.35,-1.425) 0(14.35,-1.425)
  rect 0.3x1.2 smd: 1(-12.25,1.425) 2(-11.75,1.425) 3(-11.25,1.425) 4(-10.75,1.425) 5(-10.25,1.425) 6(-9.75,1.425) 7(-9.25,1.425) 8(-8.75,1.425) 9(-8.25,1.425) 10(-7.75,1.425) 11(-7.25,1.425) 12(-6.75,1.425) 13(-6.25,1.425) 14(-5.748,1.423) 15(-5.25,1.425) 16(-4.75,1.425) 17(-4.25,1.425) 18(-3.75,1.425) 19(-3.25,1.425) 20(-2.75,1.425) 21(-2.25,1.425) 22(-1.75,1.425) 23(-1.25,1.425) 24(-0.75,1.425) 25(-0.25,1.425) 26(0.25,1.425) 27(0.75,1.425) 28(1.25,1.425) 29(1.75,1.425) 30(2.25,1.425) 31(2.75,1.425) 32(3.25,1.425) 33(3.75,1.425) 34(4.25,1.425) 35(4.75,1.425) 36(5.25,1.425) 37(5.75,1.425) 38(6.25,1.425) 39(6.75,1.425) 40(7.25,1.425) 41(7.75,1.425) 42(8.25,1.425) 43(8.75,1.425) 44(9.25,1.425) 45(9.75,1.425) 46(10.25,1.425) 47(10.75,1.425) 48(11.25,1.425) 49(11.75,1.425) 50(12.25,1.425)
Top Overlay:
  lines w0.254: -15.5,-4 15.5,-4 ; -15.5,1.626 -12.8,1.626 ; 12.8,1.626 15.5,1.626
3D body "54132-5062.stp": height 2.05, standoff 0, extent -15.25,-5.509 15.25,1.641

## FPC-SMD_AFC18-S80FIA-00 [mm]
pads (82):
  rect 0.3x0.7 smd: 1(-19.75,1.369) 2(-19.25,1.369) 3(-18.75,1.369) 4(-18.25,1.369) 5(-17.75,1.369) 6(-17.25,1.369) 7(-16.75,1.369) 8(-16.25,1.369) 9(-15.75,1.369) 10(-15.25,1.369) 11(-14.75,1.369) 12(-14.25,1.369) 13(-13.75,1.369) 14(-13.25,1.369) 15(-12.75,1.369) 16(-12.25,1.369) 17(-11.75,1.369) 18(-11.25,1.369) 19(-10.75,1.369) 20(-10.25,1.369) 21(-9.75,1.369) 22(-9.25,1.369) 23(-8.75,1.369) 24(-8.25,1.369) 25(-7.75,1.369) 26(-7.25,1.369) 27(-6.75,1.369) 28(-6.25,1.369) 29(-5.75,1.369) 30(-5.25,1.369) 31(-4.75,1.369) 32(-4.25,1.369) 33(-3.75,1.369) 34(-3.25,1.369) 35(-2.75,1.369) 36(-2.25,1.369) 37(-1.75,1.369) 38(-1.25,1.369) 39(-0.75,1.369) 40(-0.25,1.369) 41(0.25,1.369) 42(0.75,1.369) 43(1.25,1.369) 44(1.75,1.369) 45(2.25,1.369) 46(2.75,1.369) 47(3.25,1.369) 48(3.75,1.369) 49(4.25,1.369) 50(4.75,1.369) 51(5.25,1.369) 52(5.75,1.369) 53(6.25,1.369) 54(6.75,1.369) 55(7.25,1.369) 56(7.75,1.369) 57(8.25,1.369) 58(8.75,1.369) 59(9.25,1.369) 60(9.75,1.369) 61(10.25,1.369) 62(10.75,1.369) 63(11.25,1.369) 64(11.75,1.369) 65(12.25,1.369) 66(12.75,1.369) 67(13.25,1.369) 68(13.75,1.369) 69(14.25,1.369) 70(14.75,1.369) 71(15.25,1.369) 72(15.75,1.369) 73(16.25,1.369) 74(16.75,1.369) 75(17.25,1.369) 76(17.75,1.369) 77(18.25,1.369) 78(18.75,1.369) 79(19.25,1.369) 80(19.75,1.369)
  rect 2x1.6 smd: 81(22,-1.369) 82(-22,-1.369)
Top Overlay:
  circle w0.25: c-20.312,1.659 r0.125
  lines w0.254: -22.05,-2.382 -21.25,-2.382 -21.25,-3.551 21.5,-3.551 21.5,-2.382 ; -22.05,-0.338 -22.05,1.199 -20.131,1.199 ; -21.25,-2.382 21.5,-2.382 ; 20.131,1.199 22.05,1.199 22.05,-0.338 ; 22.05,-2.382 21.5,-2.382
Mechanical 15:
  circle w0.25: c-19.743,1.486 r0.125

## FPC-SMD_F0503-ZV-18-20T-R [mm]
pads (20):
  rect 0.4x1.25 smd: 1(-4.25,-1.125) 2(-3.75,1.125) 3(-3.25,-1.125) 4(-2.75,1.125) 5(-2.25,-1.125) 6(-1.75,1.125) 7(-1.25,-1.125) 8(-0.75,1.125) 9(-0.25,-1.125) 10(0.25,1.125) 11(0.75,-1.125) 12(1.25,1.125) 13(1.75,-1.125) 14(2.25,1.125) 15(2.75,-1.125) 16(3.25,1.125) 17(3.75,-1.125) 18(4.25,1.125)
  rect 2x2 smd: 19(6.05,0) 20(-6.05,0)
Top Overlay:
  circle w0.254: c-4.342,-2.286 r0.127
  lines w0.254: -5.043,1.778 -4.179,1.778 ; -4.679,-1.778 -7.644,-1.778 -7.644,1.778 -4.215,1.778 ; -3.821,-1.778 -3.679,-1.778 ; -3.321,1.778 -3.179,1.778 ; -2.821,-1.778 -2.679,-1.778 ; -2.321,1.778 -2.179,1.778 ; -1.821,-1.778 -1.679,-1.778 ; -1.321,1.778 -1.179,1.778 ; -0.821,-1.778 -0.679,-1.778 ; -0.321,1.778 -0.179,1.778 ; 0.179,-1.778 0.321,-1.778 ; 0.679,1.778 0.821,1.778 ; 1.179,-1.778 1.321,-1.778 ; 1.679,1.778 1.821,1.778 ; 2.179,-1.778 2.321,-1.778 ; 2.679,1.778 2.821,1.778 ; 3.179,-1.778 3.321,-1.778 ; 3.679,1.778 3.821,1.778 ; 4.155,-1.778 7.62,-1.778 7.62,1.778 4.655,1.778
Mechanical 6:
  region: -6.096,1.016 -3.81,1.016 -3.81,0.254 3.937,0.254 3.937,1.016 6.096,1.016 6.096,-1.016 -6.096,-1.016
Mechanical 15:
  region: 5.25,-0.55 5.25,0.55 6.85,0.55 6.85,-0.55
  region: -6.85,-0.55 -6.85,0.55 -5.25,0.55 -5.25,-0.55
  region: 4.15,1.499 4.35,1.499 4.35,0.599 4.15,0.599
  region: 3.65,-0.599 3.85,-0.599 3.85,-1.499 3.65,-1.499
  region: 3.15,1.499 3.35,1.499 3.35,0.599 3.15,0.599
  region: 2.65,-0.599 2.85,-0.599 2.85,-1.499 2.65,-1.499
  region: 2.15,1.499 2.35,1.499 2.35,0.599 2.15,0.599
  region: 1.65,-0.599 1.85,-0.599 1.85,-1.499 1.65,-1.499
  region: 1.15,1.499 1.35,1.499 1.35,0.599 1.15,0.599
  region: 0.65,-0.599 0.85,-0.599 0.85,-1.499 0.65,-1.499
  region: 0.15,1.499 0.35,1.499 0.35,0.599 0.15,0.599
  region: -0.35,-0.599 -0.15,-0.599 -0.15,-1.499 -0.35,-1.499
  region: -0.85,1.499 -0.65,1.499 -0.65,0.599 -0.85,0.599
  region: -1.35,-0.599 -1.15,-0.599 -1.15,-1.499 -1.35,-1.499
  region: -1.85,1.499 -1.65,1.499 -1.65,0.599 -1.85,0.599
  region: -2.35,-0.599 -2.15,-0.599 -2.15,-1.499 -2.35,-1.499
  region: -2.85,1.499 -2.65,1.499 -2.65,0.599 -2.85,0.599
  region: -3.35,-0.599 -3.15,-0.599 -3.15,-1.499 -3.35,-1.499
  region: -3.85,1.499 -3.65,1.499 -3.65,0.599 -3.85,0.599
  region: -4.35,-0.599 -4.15,-0.599 -4.15,-1.499 -4.35,-1.499
  region: -7.54,-1.499 -7.54,-1.474 -7.575,-1.439 -7.625,-1.439 -7.66,-1.474 -7.66,-1.499 -7.66,-1.524 -7.625,-1.559 -7.575,-1.559 -7.54,-1.524 -7.54,-1.499
  lines w0.051: -7.6,-1 7.6,-1 7.6,1 -7.6,1 -7.6,-1
3D body "Unnamed-PCBModelFPC-SMD_F0503-ZV-18-20T-R.step": height 4.61, standoff 0, extent -7.6,-1.48 7.6,1.48

## FPC-SMD_F1003-V-20-25T-R [mm]
pads (40):
  rect 0.6x2 smd: 1(-9.5,-1.75) 1(-9.5,1.75) 2(-8.5,-1.75) 2(-8.5,1.75) 3(-7.5,-1.75) 3(-7.5,1.75) 4(-6.5,-1.75) 4(-6.5,1.75) 5(-5.5,-1.75) 5(-5.5,1.75) 6(-4.5,-1.75) 6(-4.5,1.75) 7(-3.5,-1.75) 7(-3.5,1.75) 8(-2.5,-1.75) 8(-2.5,1.75) 9(-1.5,-1.75) 9(-1.5,1.75) 10(-0.5,-1.75) 10(-0.5,1.75) 11(0.5,-1.75) 11(0.5,1.75) 12(1.5,-1.75) 12(1.5,1.75) 13(2.5,-1.75) 13(2.5,1.75) 14(3.5,-1.75) 14(3.5,1.75) 15(4.5,-1.75) 15(4.5,1.75) 16(5.5,-1.75) 16(5.5,1.75) 17(6.5,-1.75) 17(6.5,1.75) 18(7.5,-1.75) 18(7.5,1.75) 19(8.5,-1.75) 19(8.5,1.75) 20(9.5,-1.75) 20(9.5,1.75)
Top Overlay:
  circle w0.254: c-10.414,-2.159 r0.127
  lines w0.254: -10.031,-1.524 -13.462,-1.524 -13.462,1.524 -10.031,1.524 ; 10.031,-1.524 13.462,-1.524 13.462,1.524 10.031,1.524
Mechanical 6:
  region: 11.527,-1.308 -12.07,-1.308 -12.07,1.181 -9.962,1.181 -9.962,-0.013 9.419,-0.013 9.419,1.181 11.527,1.181 11.527,0.774 11.527,0.101
Mechanical 15:
  drawing of 45 lines, arcs and shapes, not listed
3D body "FPC-SMD_F1003-V-20-25T-R^FPC1_3D_PCB1_2023-10-07(2)_3D_PCB1_2023-10-07.STEP": height 5.61, standoff 0, extent -13.5,-2.25 13.5,2.25

## FPC-SMD_P06_0.5MM [mm]
pads (8):
  rect 2.2x3.3 smd: 0(-3.6,-1.296) 0(3.6,-1.296)
  rect 0.3x1.5 smd: 1(-1.25,1.546) 2(-0.75,1.546) 3(-0.25,1.546) 4(0.25,1.546) 5(0.75,1.546) 6(1.25,1.546)
Top Overlay:
  lines w0.254: -4.3,-3.192 -4.3,-3.76 4.3,-3.76 4.3,-3.192 ; -4.3,0.6 -4.3,1.59 -1.75,1.59 ; 1.75,1.59 4.3,1.59 4.3,0.6

## FPC-SMD_P20_0.5MM [mm]
pads (22):
  rect 2.2x3.3 smd: 0(-6.301,-1.084) 0(6.301,-1.084)
  rect 0.3x1.5 smd: 1(-4.699,1.084) 2(-4.199,1.084) 3(-3.699,1.084) 4(-3.199,1.084) 5(-2.699,1.084) 6(-2.199,1.084) 7(-1.699,1.084) 8(-1.199,1.084) 9(-0.699,1.084) 10(-0.199,1.084) 11(0.301,1.084) 12(0.801,1.084) 13(1.301,1.084) 14(1.803,1.083) 15(2.301,1.084) 16(2.801,1.084) 17(3.301,1.084) 18(3.801,1.084) 19(4.301,1.084) 20(4.801,1.084)
Top Overlay:
  lines w0.254: -5.08,1.286 -7.8,1.286 -7.8,-4.064 7.8,-4.064 7.8,1.286 5.182,1.286
3D body "1816389_2-1734839-0.stp": height 2.1, standoff 0.05, extent -7.715,-3.967 7.715,1.143